# Altium footprint library amirlib.PcbLib: 456 footprints (part 18 of 29)
Each footprint in its own frame and in the unit in brackets; x right, y up, seen from the top. Pads: shape width x height; smd on the part's side, far side on the other; paste and mask are expansions set on the pad; w line width, h text height; cw(c..) or ccw(c..) is an arc to the next point about the centre after c.
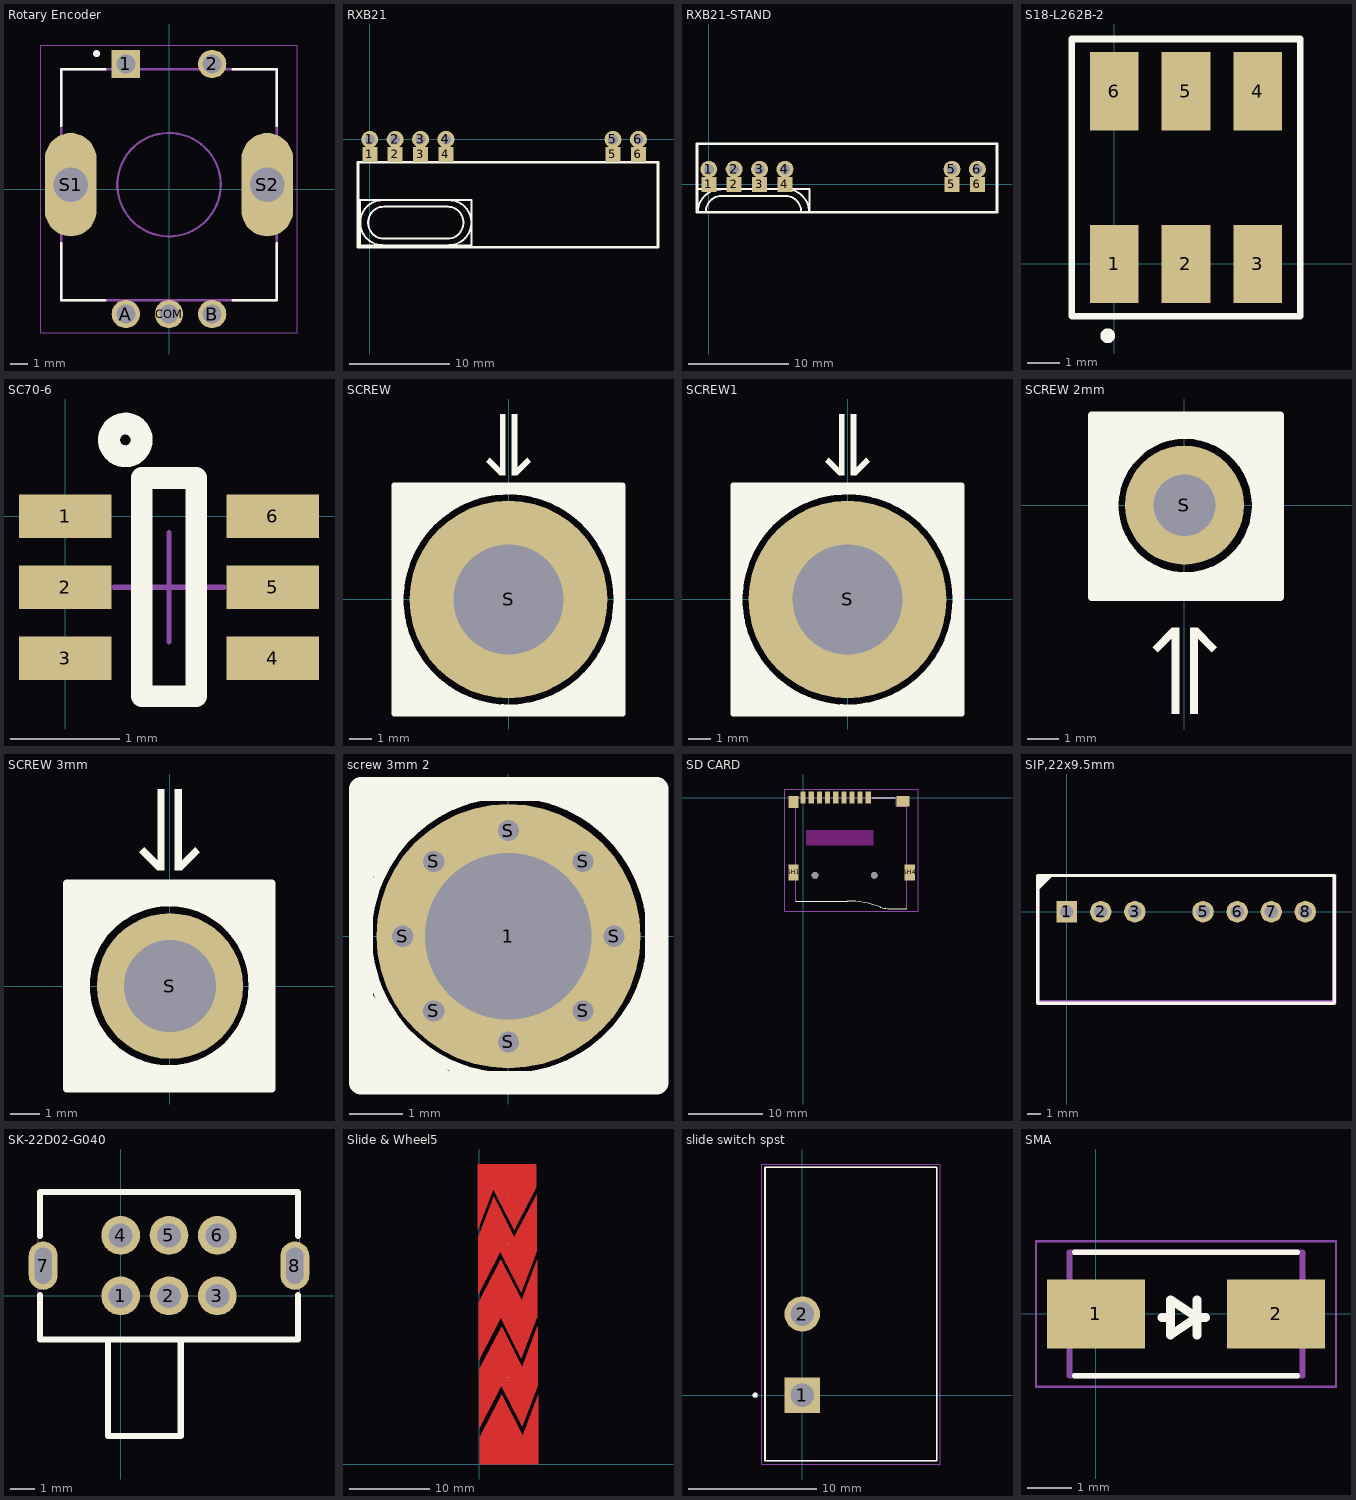
[diagram p17: the footprints below, top view; thin cyan lines are the x and y axes]

## Rotary Encoder [mm]
pads (7):
  rect 1.65x1.65 hole 1.1: 1(-2.5,7.25)
  round 1.65 hole 1.1: 2(2.5,7.25) A(-2.5,-7.25) B(2.5,-7.25) COM(0,-7.25)
  oval 3x6 hole 2 square: S1(-5.7,0.25) S2(5.7,0.25)
Top Overlay:
  circle w0.2: c-4.2,7.85 r0.1
  lines w0.127: -6.25,-3.15 -6.25,-6.45 -3.7,-6.45 ; -6.25,3.65 -6.25,6.95 -3.7,6.95 ; 3.7,-6.45 6.25,-6.45 6.25,-3.15 ; 3.7,6.95 6.25,6.95 6.25,3.65
Mechanical 13:
  circle w0.127: c0,0.25 r3
  circle w0.2: c-4.2,7.85 r0.1
  lines w0.127: -6.25,-6.45 6.25,-6.45 6.25,6.95 -6.25,6.95 -6.25,-6.45
Mechanical 15:
  lines w0.05: -7.45,-8.35 -7.45,8.35 7.45,8.35 7.45,-8.35 -7.45,-8.35
3D body "PEC11R-4215F-S0024--3DModel-STEP-56544.STEP": height 21.5, standoff -3.7, extent -6.927,-7.25 6.927,7.45

## RXB21 [mm]
pads (12):
  rect 1.5x1.5 smd: 1(0,-1.5) 2(2.54,-1.5) 3(5.08,-1.5) 4(7.62,-1.5) 5(24.32,-1.5) 6(26.86,-1.5)
  round 1.7 hole 1 mask+0.2: 1(0,0) 2(2.54,0) 3(5.08,0) 4(7.62,0) 5(24.32,0) 6(26.86,0)
Top Overlay:
  lines w0.2: 1.298,-10.575 cw(c1.298,-8.325) 1.298,-6.075 ; 1.4,-9.925 7.8,-9.925 ; 1.4,-6.725 7.8,-6.725 ; 1.425,-9.925 cw(c1.425,-8.325) 1.425,-6.725 ; 7.775,-9.925 ccw(c7.775,-8.325) 7.775,-6.725 ; 7.902,-10.575 ccw(c7.902,-8.325) 7.902,-6.075 ; -0.988,-10.611 -0.988,-6.039 10.188,-6.039 10.188,-10.611 -0.988,-10.611
  lines w0.254: -1.175,-10.775 28.82,-10.775 28.82,-2.275 -1.175,-2.275 -1.175,-10.775
3D body "HC-49_LT_THT_16MHz.step": height 5.1, standoff -0.49, extent -1.075,-10.65 10.275,-6

## RXB21-STAND [mm]
pads (12):
  rect 1.5x1.5 smd: 1(0,0) 2(2.54,0) 3(5.08,0) 4(7.62,0) 5(24.32,0) 6(26.86,0)
  round 1.7 hole 1 mask+0.2: 1(0,1.5) 2(2.54,1.5) 3(5.08,1.5) 4(7.62,1.5) 5(24.32,1.5) 6(26.86,1.5)
Top Overlay:
  lines w0.2: -1.115,-0.475 10.061,-0.475 10.061,-2.794 ; -1.079,-2.797 cw(c1.171,-2.761) 1.171,-0.511 ; -0.302,-2.795 cw(c1.298,-2.761) 1.298,-1.161 ; 1.273,-1.161 7.673,-1.161 ; 7.648,-1.161 cw(c7.648,-2.761) 9.248,-2.796 ; 7.775,-0.511 cw(c7.775,-2.761) 10.025,-2.796
  lines w0.254: -1.175,-2.794 28.82,-2.794 28.82,4.064 -1.175,4.064 -1.175,-2.794
3D body "User Library-pc-jc02RA.STEP": height 9, standoff -8.68, extent -1.27,-2.825 28.73,4.095

## S18-L262B-2 [mm]
pads (6):
  rect 1.5x2.4 smd: 1(0,0) 2(2.2,0) 3(4.4,0) 4(4.4,5.3) 5(2.2,5.3) 6(0,5.3)
Top Overlay:
  circle w0.254: c-0.2,-2.2 r0.1
  lines w0.2: -1.3,-1.6 -1.3,6.9 5.7,6.9 5.7,-1.6 -1.3,-1.6

## SC70-6 [mm]
pads (6):
  rect 0.85x0.4 smd mask+0.05: 1(0,0) 2(0,-0.65) 3(0,-1.3) 4(1.9,-1.3) 5(1.9,-0.65) 6(1.9,0)
Top Overlay:
  circle w0.2: c0.55,0.7 r0.15
  lines w0.2: 0.7,-1.65 0.7,0.35 1.2,0.35 1.2,-1.65 0.7,-1.65
Mechanical 15:
  lines w0.05: 0.45,-0.65 1.45,-0.65 ; 0.95,-1.15 0.95,-0.15
3D body "User Library-SC70-6.STEP": height 0.92, standoff -0.03, extent -0.1,-1.65 2,0.35

## SCREW [mm]
pads (1):
  round 9 hole 5 mask+0.1: S(0,0)
Top Overlay:
  rectangle: 0.142,5.646 0.396,8.44
  region: 1.025,6.275 0.845,6.455 0.217,5.826 0.396,5.646
  region: -0.142,8.44 -0.396,8.44 -0.396,5.646 -0.142,5.646
  region: -0.396,5.646 -0.217,5.826 -0.845,6.455 -1.025,6.275
  region: 1.913,4.752 1,5.125 3.925,5.125 3.925,3.825 4.225,3.525 4.163,3.062 3.337,3.888
  region: 5.15,-5.126 5.148,-5.129 0.686,-5.211 3.449,-3.649 5.148,-0.75
  region: -5.135,-5.185 -5.132,-5.188 -0.979,-5.079 -3.635,-3.69 -5.132,-0.925
  region: -5.225,5.194 -5.222,5.197 -0.975,5.194 -3.662,3.638 -5.222,0.947
  region: 3.188,5.213 5.162,5.213 5.162,0.937
  lines w0.254: -5.2,-5.2 -5.2,5.2 5.175,5.2 5.2,5.175 5.2,-5.2 -5.2,-5.2
  lines w0.45: 5,0 cw(c0,0) 5,0.053
Bottom Overlay:
  circle w0.4: c-0.025,0.012 r5
  region: 5.098,5.197 5.095,5.2 0.875,5.197 3.475,3.575 5.098,0.875
  region: -5.25,5.195 -5.247,5.197 -0.925,5.195 -3.5,3.675 -5.247,1.05
  region: -5.123,-5.122 -5.12,-5.125 -0.8,-5.122 -3.6,-3.6 -5.123,-1.025
  region: 5.146,-5.118 5.143,-5.121 0.925,-5.118 3.7,-3.45 5.143,-0.8
  lines w0.254: -5.205,-5.2 -5.205,5.2 5.2,5.2 5.2,-5.2 -5.205,-5.2

## SCREW1 [mm]
pads (1):
  round 9 hole 5 mask+0.1: S(0,0)
Top Overlay:
  rectangle: 0.142,5.646 0.396,8.44
  region: 1.025,6.275 0.845,6.455 0.217,5.826 0.396,5.646
  region: -0.142,8.44 -0.396,8.44 -0.396,5.646 -0.142,5.646
  region: -0.396,5.646 -0.217,5.826 -0.845,6.455 -1.025,6.275
  region: 1.913,4.752 1,5.125 3.925,5.125 3.925,3.825 4.225,3.525 4.163,3.063 3.337,3.888
  region: 5.15,-5.126 5.148,-5.129 0.686,-5.211 3.449,-3.649 5.148,-0.75
  region: -5.135,-5.185 -5.132,-5.188 -0.979,-5.079 -3.635,-3.69 -5.132,-0.925
  region: -5.225,5.194 -5.222,5.197 -0.975,5.194 -3.662,3.638 -5.222,0.947
  region: 3.188,5.213 5.163,5.213 5.163,0.938
  lines w0.254: -5.2,-5.2 -5.2,5.2 5.175,5.2 5.2,5.175 5.2,-5.2 -5.2,-5.2
  lines w0.45: 5,0 cw(c0,0) 5,0.053
Bottom Overlay:
  circle w0.4: c-0.025,0.012 r5
  region: 5.098,5.197 5.095,5.2 0.875,5.197 3.475,3.575 5.098,0.875
  region: -5.25,5.195 -5.247,5.197 -0.925,5.195 -3.5,3.675 -5.247,1.05
  region: -5.123,-5.122 -5.12,-5.125 -0.8,-5.122 -3.6,-3.6 -5.123,-1.025
  region: 5.146,-5.118 5.143,-5.121 0.925,-5.118 3.7,-3.45 5.143,-0.8
  lines w0.254: -5.205,-5.2 -5.205,5.2 5.2,5.2 5.2,-5.2 -5.205,-5.2

## SCREW 2mm [mm]
pads (1):
  round 3.85 hole 2 mask+0.1: S(0,0)
Top Overlay:
  circle w0.889: c0.025,-0.012 r2.6
  region: 0.431,-3.957 0.252,-4.137 0.88,-4.765 1.06,-4.586
  rectangle: 0.177,-6.751 0.431,-3.957
  region: -1.04,-4.586 -0.86,-4.765 -0.231,-4.137 -0.411,-3.957
  region: -0.157,-3.957 -0.411,-3.957 -0.411,-6.751 -0.157,-6.751
  region: 3.071,-2.868 3.069,-2.871 0.329,-2.871 0.329,-2.821 3.071,-0.079
  region: -2.95,-2.894 -2.947,-2.897 -0.207,-2.897 -0.207,-2.848 -2.95,-0.105
  region: -2.971,2.818 -2.968,2.821 -0.229,2.821 -0.229,2.771 -2.971,0.029
  region: 3.078,2.947 3.075,2.95 0.335,2.95 0.335,2.901 3.078,0.158
  lines w0.254: -3,-2.975 3.1,-2.975 3.1,2.9 -3,2.9 -3,-2.975
Bottom Overlay:
  circle w0.889: c0.025,-0.012 r2.6
  region: 3.071,-2.868 3.069,-2.871 0.329,-2.871 0.329,-2.821 3.071,-0.079
  region: 3.053,2.897 3.05,2.9 0.31,2.9 0.31,2.851 3.053,0.108
  region: -2.971,2.818 -2.968,2.821 -0.229,2.821 -0.229,2.771 -2.971,0.029
  region: -2.95,-2.894 -2.947,-2.897 -0.207,-2.897 -0.207,-2.848 -2.95,-0.105
  lines w0.254: -2.971,-2.925 -2.971,2.9 3,2.9 3,-2.925 -2.971,-2.925

## SCREW 3mm [mm]
pads (1):
  round 5 hole 3.15 mask+0.1: S(0,0)
Top Overlay:
  circle w0.889: c-0.025,0.012 r3.165
  rectangle: 0.156,3.957 0.41,6.751
  region: 1.038,4.586 0.859,4.765 0.23,4.137 0.41,3.957
  region: -0.179,6.751 -0.433,6.751 -0.433,3.957 -0.179,3.957
  region: -0.433,3.957 -0.253,4.137 -0.882,4.765 -1.062,4.586
  region: 3.492,-3.505 3.489,-3.508 0.749,-3.508 0.749,-3.458 3.492,-0.716
  region: -3.559,-3.508 -3.556,-3.51 -0.816,-3.51 -0.816,-3.461 -3.559,-0.718
  region: -3.559,3.526 -3.556,3.528 -0.816,3.528 -0.816,3.479 -3.559,0.736
  region: 3.492,3.528 3.489,3.531 0.749,3.531 0.749,3.482 3.492,0.739
  lines w0.254: -3.542,-3.505 -3.542,3.528 3.492,3.528 ; -3.539,-3.522 3.494,-3.522 3.494,3.511
Bottom Overlay:
  circle w0.889: c-0.025,0.012 r3.165
  region: 3.492,3.528 3.489,3.531 0.749,3.531 0.749,3.482 3.492,0.739
  region: -3.559,3.526 -3.556,3.528 -0.816,3.528 -0.816,3.479 -3.559,0.736
  region: -3.559,-3.508 -3.556,-3.51 -0.816,-3.51 -0.816,-3.461 -3.559,-0.718
  region: 3.492,-3.505 3.489,-3.508 0.749,-3.508 0.749,-3.458 3.492,-0.716
  lines w0.254: -3.542,-3.505 -3.542,3.528 3.492,3.528 ; -3.539,-3.522 3.494,-3.522 3.494,3.511

## screw 3mm 2 [mm]
pads (9):
  round 5 hole 3.15 mask+0.1: 1(0,0)
  round 0.6 hole 0.4: S(-2,0) S(-1.414,-1.414) S(-1.414,1.414) S(0,-2) S(0,2) S(1.414,-1.414) S(1.414,1.414) S(2,0)
Top Overlay:
  circle w0.2: c0.019,0.018 r2.7
  region: 2.687,2.678 1.042,2.68 2.687,1.034
  region: -2.827,2.677 -1.022,2.679 -2.827,0.874
  region: -2.823,-2.849 -0.832,-2.851 -2.823,-0.86
  region: 2.694,-2.858 0.833,-2.86 2.694,-0.999
  lines w0.45: -2.787,-2.772 2.805,-2.772 2.805,2.786 -2.787,2.786 -2.787,-2.772
Bottom Overlay:
  circle w0.2: c0.025,-0.012 r2.7
  region: -2.817,-2.879 -0.826,-2.881 -2.817,-0.89
  region: 2.7,-2.888 0.839,-2.89 2.7,-1.029
  region: 2.693,2.648 1.048,2.65 2.693,1.004
  region: -2.821,2.647 -1.016,2.649 -2.821,0.844
  lines w0.45: -2.781,-2.802 -2.781,2.756 2.811,2.756 2.811,-2.802 -2.781,-2.802
3D body "CRAFTECH-MHN2038-19-108.STEP": height 2.11, standoff -4.89, extent -2.813,-2.855 2.687,2.621

## SD CARD [mm]
pads (15):
  rect 0.7x1.6 smd: P1(8.8,0) P2(7.7,0) P3(6.6,0) P4(5.5,0) P5(4.4,0) P6(3.3,0) P7(2.2,0) P8(1.1,0) P9(0,0)
  rect 1.4x2.2 smd: SH1(-1.3,-10.1) SH4(14.4,-10.1)
  rect 1.4x1.6 smd: SH2(-1.3,-0.6)
  rect 1.8x1.4 smd: SH3(13.5,-0.5)
  round 0.9 hole 0.9 unplated: ""(1.6,-10.5) ""(9.6,-10.5)
Top Overlay:
  lines w0.127: -1.007,-13.97 5.927,-13.97 cw(c5.927,-26.67) 10.478,-14.814 ; 9.35,0 12.45,0 ; 10.441,-14.799 ccw(c11.448,-12.177) 11.448,-14.986 13.979,-14.986
Keep-Out Layer:
  region: 9.452,-6.403 0.447,-6.403 0.447,-4.402 9.452,-4.402
Mechanical 13:
  lines w0.127: -1.007,-13.97 -1.007,0 12.582,0 12.582,-1.143 13.979,-1.143 13.979,-14.986
Mechanical 15:
  lines w0.127: -2.47,-15.33 -2.47,1.17 15.53,1.17 15.53,-15.33 -2.47,-15.33
3D body "ST-TF-003A--3DModel-STEP-56544.STEP": height 1.9, standoff -0.55, extent -1.5,-14.481 14.6,0.519

## SIP,22x9.5mm [mm]
pads (7):
  rect 1.524x1.6 hole 1 paste-2539.97 mask+0.051: 1(0,0)
  round 1.6 hole 1 paste-2539.97 mask+0.051: 2(2.54,0) 3(5.08,0) 5(10.16,0) 6(12.7,0) 7(15.24,0) 8(17.78,0)
Top Overlay:
  region: -2.159,2.7 -2.159,1.557 -1.016,2.7
  lines w0.254: -2.159,-6.825 -2.159,2.7 19.939,2.7 19.939,-6.825 -2.159,-6.825
Mechanical 15:
  region: -2.032,2.667 -2.286,2.667 -2.286,-6.858 20.066,-6.858 20.066,2.794 19.812,2.794 19.812,-6.604 -2.032,-6.604
3D body "EVISUN_VRB0505S-5WR3_C52192007_FootprintMatched.step": height 12.1, standoff -4.1, extent -2.009,-6.787 19.991,2.713

## SK-22D02-G040 [mil]
pads (8):
  round 63 hole 39.4 paste-99999 mask+2: 1(0,0) 2(78.7,0) 3(157.5,0) 4(0,98.4) 5(78.7,98.4) 6(157.5,98.4)
  oval 47.2x78.7 hole 27.6 slot 59.1 at 90 deg paste-99999 mask+2: 7(-126,49.2) 8(283.5,49.2)
Top Overlay:
  lines w10: -131.3,1.2 -131.3,-70.8 288.7,-70.8 288.7,1.2 ; -131.3,97.2 -131.3,169.2 288.7,169.2 288.7,97.2 ; -20.3,-70.8 -20.3,-228.3 97.8,-228.3 97.8,-70.8
Mechanical 6:
  lines w2: -133.9,-70.9 -133.9,169.3 291.3,169.3 291.3,-70.9 97.8,-70.9 97.8,-228.3 -20.3,-228.3 -20.3,-70.9 -133.9,-70.9

## Slide & Wheel5 [mil]
pads (5):
  round 1 smd: 1(136.43,1305.09) 2(138.48,1073.44) 3(140.3,753.85) 4(143.35,424.31) 5(145.67,170.97)
Top Layer:
  region: -6.42,1144.09 -6.42,1466.09 279.28,1466.09 279.28,1352.2 170.58,1145.09 69.58,1343.09
  region: -4.37,831.28 -4.37,1107.5 71.63,1306.5 172.63,1108.5 281.33,1315.6 281.33,1039.39 205.33,840.39 104.33,1038.39
  region: -2.6,508.07 -2.6,791.44 -2.5,791.54 106.2,998.64 207.2,800.64 283.2,999.64 283.2,714.81 281.79,714.81 206.82,518.5 106.3,715.55
  region: 0.55,176.76 0.55,464.39 0.45,464.39 109.35,671.87 209.87,474.82 284.84,671.13 286.25,671.13 286.25,384.86 210.25,185.86 109.25,383.86
  region: 2.82,1.97 2.82,131.87 111.52,338.97 212.52,140.97 288.52,339.97 288.52,1.97

## slide switch spst [mm]
pads (2):
  rect 2.775x2.775 / inner round 2.775 / far side rect 2.775x2.775 hole 1.85: 1(0,0)
  round 2.775 hole 1.85: 2(0,6.35)
Top Overlay:
  circle w0.2: c-3.69,0 r0.1
  lines w0.127: -2.92,-5.145 10.54,-5.145 10.54,17.845 -2.92,17.845 -2.92,-5.145
Mechanical 13:
  circle w0.2: c-3.69,0 r0.1
  lines w0.127: -2.92,-5.145 10.54,-5.145 10.54,17.845 -2.92,17.845 -2.92,-5.145
Mechanical 15:
  lines w0.05: -3.17,-5.395 -3.17,18.095 10.79,18.095 10.79,-5.395 -3.17,-5.395
3D body "step_temp.STEP": height 18.41, standoff -3.56, extent -2.921,-5.143 10.541,17.843

## SMA [mm]
pads (2):
  rect 2.22x1.57 smd: 1(0,0) 2(4.08,0)
Top Overlay:
  lines w0.127: -0.48,-1.4 4.56,-1.4 ; -0.48,1.4 4.56,1.4
  lines w0.2: 1.489,-0.076 1.689,-0.076 ; 2.289,-0.476 2.289,0.324 ; 2.489,-0.076 2.289,-0.076 ; 2.289,-0.076 1.689,-0.476 1.689,0.324 2.289,-0.076
Mechanical 13:
  lines w0.127: -0.6,-1.4 4.68,-1.4 4.68,1.4 -0.6,1.4 -0.6,-1.4
Mechanical 15:
  lines w0.05: -1.36,-1.65 5.44,-1.65 5.44,1.65 -1.36,1.65 -1.36,-1.65
3D body "User Library-SMAJ.STEP": height 2, standoff 0.01, extent -0.433,-1.27 4.497,1.27